# Altium footprint library Smart_Gateway_Rev1.0.PcbLib: 51 footprints (part 4 of 4)
Each footprint in its own frame and in the unit in brackets; x right, y up, seen from the top. Pads: shape width x height; smd on the part's side, far side on the other; paste and mask are expansions set on the pad; w line width, h text height; cw(c..) or ccw(c..) is an arc to the next point about the centre after c.
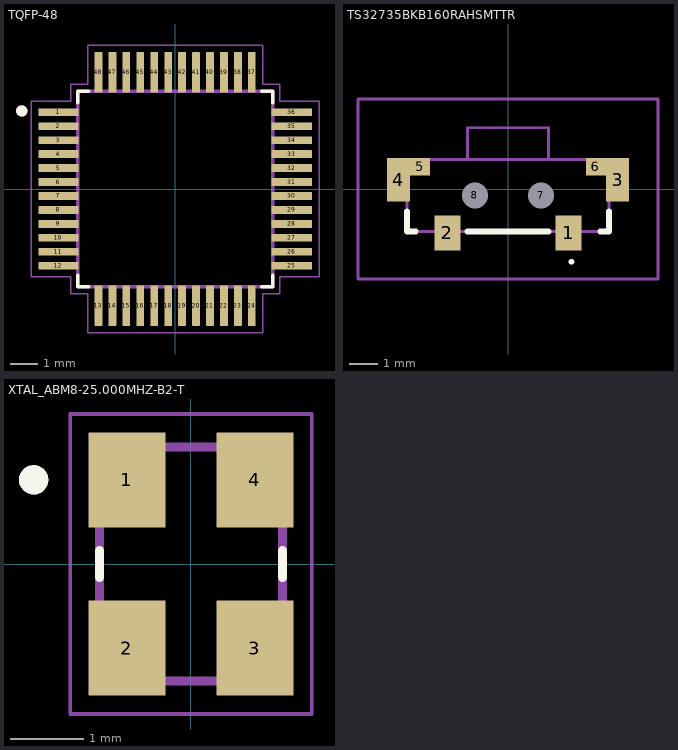
[diagram p3: the footprints below, top view; thin cyan lines are the x and y axes]

## TQFP-48 [mm]
pads (48):
  rrect7% 1.44x0.28 smd: 1(-4.185,2.75) 2(-4.185,2.25) 3(-4.185,1.75) 4(-4.185,1.25) 5(-4.185,0.75) 6(-4.185,0.25) 7(-4.185,-0.25) 8(-4.185,-0.75) 9(-4.185,-1.25) 10(-4.185,-1.75) 11(-4.185,-2.25) 12(-4.185,-2.75) 25(4.185,-2.75) 26(4.185,-2.25) 27(4.185,-1.75) 28(4.185,-1.25) 29(4.185,-0.75) 30(4.185,-0.25) 31(4.185,0.25) 32(4.185,0.75) 33(4.185,1.25) 34(4.185,1.75) 35(4.185,2.25) 36(4.185,2.75)
  rrect7% 0.28x1.44 smd: 13(-2.75,-4.185) 14(-2.25,-4.185) 15(-1.75,-4.185) 16(-1.25,-4.185) 17(-0.75,-4.185) 18(-0.25,-4.185) 19(0.25,-4.185) 20(0.75,-4.185) 21(1.25,-4.185) 22(1.75,-4.185) 23(2.25,-4.185) 24(2.75,-4.185) 37(2.75,4.185) 38(2.25,4.185) 39(1.75,4.185) 40(1.25,4.185) 41(0.75,4.185) 42(0.25,4.185) 43(-0.25,4.185) 44(-0.75,4.185) 45(-1.25,4.185) 46(-1.75,4.185) 47(-2.25,4.185) 48(-2.75,4.185)
Top Overlay:
  circle w0.2: c-5.5,2.8 r0.1
  lines w0.127: -3.5,-3.1 -3.5,-3.5 -3.1,-3.5 ; -3.5,3.1 -3.5,3.5 -3.1,3.5 ; 3.1,-3.5 3.5,-3.5 3.5,-3.1 ; 3.1,3.5 3.5,3.5 3.5,3.1
Mechanical 13:
  circle w0.2: c-5.5,2.8 r0.1
  lines w0.127: -3.5,-3.5 3.5,-3.5 3.5,3.5 -3.5,3.5 -3.5,-3.5
Mechanical 15:
  lines w0.05: -5.16,-3.14 -5.16,3.14 -3.75,3.14 -3.75,3.75 -3.14,3.75 -3.14,5.16 3.14,5.16 3.14,3.75 3.75,3.75 3.75,3.14 5.16,3.14 5.16,-3.14 3.75,-3.14 3.75,-3.75 3.14,-3.75 3.14,-5.16 -3.14,-5.16 -3.14,-3.75 -3.75,-3.75 -3.75,-3.14 -5.16,-3.14
3D body "ATSAMD21G18A-AUT.STEP": height 1.21, standoff 0.01, extent -4.5,-4.5 4.5,4.5

## TS32735BKB160RAHSMTTR [mm]
pads (8):
  rect 0.9x1.2 smd: 1(2.1,-1.525) 2(-2.1,-1.525)
  rect 0.8x1.5 smd: 3(3.8,0.325) 4(-3.8,0.325)
  rect 0.7x0.6 smd: 5(-3.05,0.775) 6(3.05,0.775)
  round 0.45 hole 0.9 unplated: 7(1.15,-0.225) 8(-1.15,-0.225)
Top Overlay:
  lines w0.1: 2.2,-2.575 cw(c2.2,-2.525) 2.2,-2.475 cw(c2.2,-2.525) 2.2,-2.575
  lines w0.2: -3.5,-0.775 -3.5,-1.475 -3.2,-1.475 ; -1.4,-1.475 1.4,-1.475 ; 3.2,-1.475 3.5,-1.475 3.5,-0.775
Mechanical 13:
  lines w0.1: -3.5,-1.475 -3.5,1.025 3.5,1.025 3.5,-1.475 -3.5,-1.475 ; -1.4,1.025 1.4,1.025 1.4,2.125 -1.4,2.125 -1.4,1.025
Mechanical 15:
  lines w0.1: -5.2,-3.125 -5.2,3.125 5.2,3.125 5.2,-3.125 -5.2,-3.125
3D body "TS32-7-35-BK-B-260-RA-SMT-TR.stp": height 3.52, standoff -0.75, extent -3.9,-2 3.9,1.87

## XTAL_ABM8-25.000MHZ-B2-T [mm]
height 0.8
pads (4):
  rect 1.05x1.3 smd: 1(-0.875,1.15) 2(-0.875,-1.15) 3(0.875,-1.15) 4(0.875,1.15)
Top Overlay:
  circle w0.2: c-2.15,1.15 r0.1
  lines w0.127: -1.25,-0.18 -1.25,0.18 ; 1.25,-0.18 1.25,0.18
Mechanical 13:
  circle w0.2: c-2.15,1.15 r0.1
  lines w0.127: -1.25,-1.6 -1.25,1.6 1.25,1.6 1.25,-1.6 -1.25,-1.6
Mechanical 15:
  lines w0.05: -1.65,-2.05 -1.65,2.05 1.65,2.05 1.65,-2.05 -1.65,-2.05
3D body "step_temp.STEP": height 0.8, standoff 0, extent -1.25,-1.6 1.25,1.6